# Altium schematic symbol library LAIL-PZ2.54-6P-L.SCHLIB: 1 symbol
Pins are listed as number, name and electrical type; pins without a type are passive.

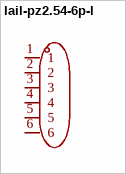
[diagram p0: symbol lail-pz2.54-6p-l]

## lail-pz2.54-6p-l
designator H??  (value not drawn)
插针结构:1x6P;间距:2.54mm;圆针/方针:方针;安装方式:直插;排数:单排;总PIN位数:6P;额定电流:3A;额定电压:250V;配合针长度:6mm;塑高:2.5mm;端接针长度:3mm;触头材质:黄铜;触头镀层:金;工作温度:-25℃~+80℃;颜色:黑色;; Manufacturer: LAILAN(莱联); AddInBom: yes; ModelId: 78d66b34ad7c4f8faa1ccf54151694d8; ModelName: CONN-TH_LAIL-PZ2.54-6P-L; ModelTransform: 599.999,98.8187,0,0,0,0,0,0,-118.11; Pin Structure: 1x6P; Pitch: 2.54mm; Circluar Pins/Square Pins: 方针; Current Rating: 3A; Voltage Rating (Max): 250V; LCSC Part Name: 1x6P 间距:2.54mm 方针 直插; SupplierPart: C54950607; ManufacturerPart: LAIL-PZ2.54-6P-L; Supplier Footprint: 插件,P=2.54mm; JLCPCB Part Class: Extended Part; Datasheet: https://item.szlcsc.com/datasheet/LAIL-PZ2.54-6P-L/58519960.html; Supplier: LCSC; ConvertToPcb: yes; SymbolName: LAIL-PZ2.54-6P-L; FootprintName: CONN-TH_LAIL-PZ2.54-6P-L; Mounting Type: 直插; Number of Rows: 单排; Number of Pins: 6P; Length of Mating Pin: 6mm; Insulation Height: 2.5mm; Length of End Connection Pin: 3mm; Contact Material: 黄铜; Contact Plating: 金; Operating Temperature: -25℃~+80℃; Color: 黑色
footprint CONN-TH_LAIL-PZ2.54-6P-L
pins: 1, 2, 3, 4, 5, 6